# Altium footprint library WR-BHD.PcbLib: 220 footprints (part 7 of 14)
Each footprint in its own frame and in the unit in brackets; x right, y up, seen from the top. Pads: shape width x height; smd on the part's side, far side on the other; paste and mask are expansions set on the pad; w line width, h text height; cw(c..) or ccw(c..) is an arc to the next point about the centre after c.
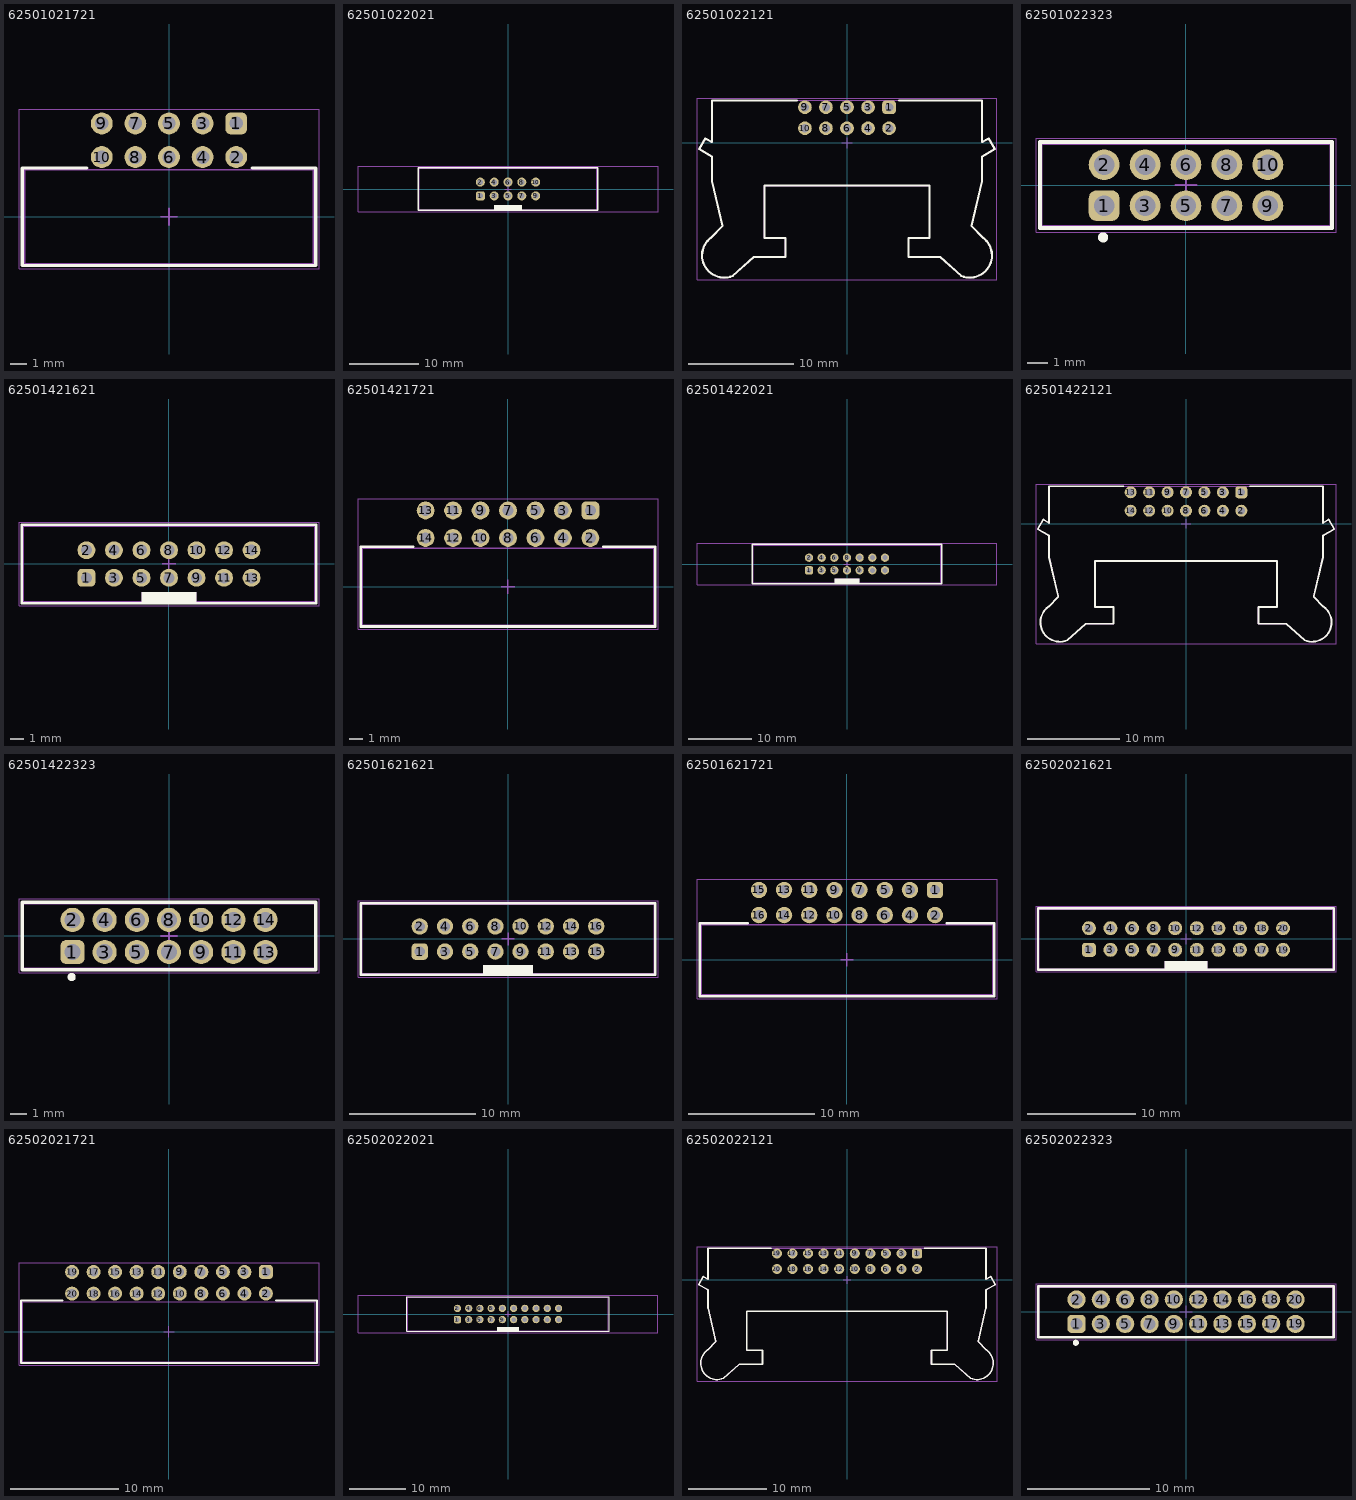
[diagram p6: the footprints below, top view; thin cyan lines are the x and y axes]

## 62501021721 [mm] "2.00mm Male Angled Box Header, 10p"
height 5.4
pads (10):
  rrect50% 1.3x1.3 hole 0.8: 1(4,5.55)
  round 1.3 hole 0.8: 2(4,3.55) 3(2,5.55) 4(2,3.55) 5(0,5.55) 6(0,3.55) 7(-2,5.55) 8(-2,3.55) 9(-4,5.55) 10(-4,3.55)
Top Overlay:
  lines w0.2: -4.9,2.9 -8.725,2.9 -8.725,-2.9 8.725,-2.9 8.725,2.9 4.95,2.9
Top Assembly:
  lines w0.1: -8.6,-2.8 -8.6,2.8 8.6,2.8 8.6,-2.8 -8.6,-2.8
Top Designator:
  text ".Designator" at -3.647,-0.357 h1
Top 3D Body:
  lines w0.1: -8.6,-2.8 8.6,-2.8 8.6,2.8 -8.6,2.8 -8.6,-2.8
Top Courtyard:
  lines w0.05: -8.925,-3.1 -8.925,6.4 8.925,6.4 8.925,-3.1 -8.925,-3.1
Top Component Center:
  lines w0.1: -0.5,0 0.5,0 ; 0,-0.5 0,0.5
3D body "62501021721.stp": height 5.5, standoff -2.83, extent -8.6,-2.8 8.6,5.85

## 62501022021 [mm] "2.00mm Male Box Header with Lever, 10p"
height 16.85
pads (10):
  rrect50% 1.3x1.3 hole 0.8: 1(-4,-1)
  round 1.3 hole 0.8: 2(-4,1) 3(-2,-1) 4(-2,1) 5(0,-1) 6(0,1) 7(2,-1) 8(2,1) 9(4,-1) 10(4,1)
Top Overlay:
  rectangle: -2,-3.1 2,-2.3
  lines w0.2: -13,-3.1 -13,3.1 13,3.1 13,-3.1 -13,-3.1
Top Assembly:
  rectangle: -2,-3 2,-2.3
  lines w0.1: -12.85,-3 -12.85,3 12.85,3 12.85,-3 -12.85,-3
Top Designator:
  text ".Designator" at -3.647,-0.357 h1
Top 3D Body:
  rectangle: -2,-3 2,-2.3
  lines w0.1: -12.85,-3 12.85,-3 12.85,3 -12.85,3 -12.85,-3
Top Courtyard:
  lines w0.05: -21.7,-3.3 21.7,-3.3 21.7,3.3 -21.7,3.3 -21.7,-3.3
Top Component Center:
  lines w0.1: -0.5,0 0.5,0 ; 0,-0.5 0,0.5
3D body "62501022021.stp": height 16.9, standoff -2.95, extent -14.062,-3 14.063,3

## 62501022121 [mm] "2.00mm Male Angled Box Header with Lever, 10p"
height 3.15
pads (10):
  rrect50% 1.3x1.3 hole 0.8: 1(4,3.4)
  round 1.3 hole 0.8: 2(4,1.4) 3(2,3.4) 4(2,1.4) 5(0,3.4) 6(0,1.4) 7(-2,3.4) 8(-2,1.4) 9(-4,3.4) 10(-4,1.4)
Top Overlay:
  lines w0.2: -13.466,0.438 -14.06,-0.59 -12.851,-1.288 -12.851,-3.622 ; -13.46,0.44 -12.848,0.087 ; -12.894,-8.986 ccw(c-11.68,-10.7) -10.865,-12.635 ; -12.892,-8.989 -11.85,-7.91 -12.837,-3.637 ; -12.85,0.089 -12.85,4.05 -4.75,4.05 ; -10.866,-12.634 -8.85,-10.85 -5.85,-10.85 -5.85,-9.05 -7.85,-9.05 -7.85,-4.05 7.85,-4.05 7.85,-9.05 5.85,-9.05 5.85,-10.85 8.85,-10.85 10.866,-12.634 ; 4.95,4.05 12.85,4.05 12.85,0.089 ; 10.865,-12.635 ccw(c11.68,-10.7) 12.894,-8.986 ; 12.837,-3.637 11.85,-7.91 12.892,-8.989 ; 12.848,0.087 13.46,0.44 ; 12.851,-3.622 12.851,-1.288 14.06,-0.59 13.466,0.438
Top Designator:
  text ".Designator" at -3.647,-0.357 h1
Top 3D Body:
  lines w0.1: -13.466,0.438 -14.06,-0.59 -12.851,-1.288 -12.851,-3.622 ; -13.46,0.44 -12.848,0.087 ; -12.894,-8.986 ccw(c-11.68,-10.7) -10.865,-12.635 ; -12.892,-8.989 -11.85,-7.91 -12.837,-3.637 ; -12.85,0.089 -12.85,4.05 12.85,4.05 ; -10.866,-12.634 -8.85,-10.85 -5.85,-10.85 -5.85,-9.05 -7.85,-9.05 -7.85,-4.05 7.85,-4.05 7.85,-9.05 5.85,-9.05 5.85,-10.85 8.85,-10.85 10.866,-12.634 ; 10.865,-12.635 ccw(c11.68,-10.7) 12.894,-8.986 ; 12.837,-3.637 11.85,-7.91 12.892,-8.989 ; 12.848,0.087 13.46,0.44 ; 12.848,4.048 12.85,4.05 ; 12.85,0.089 12.85,4.05 ; 12.851,-3.622 12.851,-1.288 14.06,-0.59 13.466,0.438
Top Courtyard:
  lines w0.05: -14.262,-13 14.262,-13 14.262,4.25 -14.262,4.25 -14.262,-13
Top Component Center:
  lines w0.1: -0.5,0 0.5,0 ; 0,-0.5 0,0.5
3D body "62501022121.stp": height 6.1, standoff -3.05, extent -14.062,-12.8 14.062,4.05

## 62501022323 [mm] "Board to Cable Transition Connector, pitch 2mm, 10p"
height 5
pads (10):
  rrect50% 1.5x1.5 hole 1: 1(-4,-1)
  round 1.5 hole 1: 2(-4,1) 3(-2,-1) 4(-2,1) 5(0,-1) 6(0,1) 7(2,-1) 8(2,1) 9(4,-1) 10(4,1)
Top Overlay:
  circle w0.25: c-4.05,-2.55 r0.125
  lines w0.2: -7.125,-2.1 -7.125,2.1 7.125,2.1 7.125,-2.1 -7.125,-2.1
Top Assembly:
  lines w0.1: -7.05,-2 -7.05,2 7.05,2 7.05,-2 -7.05,-2
Top Designator:
  text ".Designator" at -3.647,-0.357 h1
Top 3D Body:
  lines w0.1: -7.05,-2 7.05,-2 7.05,2 -7.05,2 -7.05,-2
Top Courtyard:
  lines w0.05: -7.325,-2.3 7.325,-2.3 7.325,2.3 -7.325,2.3 -7.325,-2.3
Top Component Center:
  lines w0.1: -0.5,0 0.5,0 ; 0,-0.5 0,0.5
3D body "62501022323.stp": height 7.23, standoff -2.77, extent -7.05,-2 7.05,2

## 62501421621 [mm] "2.00mm Male Box Header, 14p"
height 5.6
pads (14):
  rrect50% 1.3x1.3 hole 0.8: 1(-6,-1)
  round 1.3 hole 0.8: 2(-6,1) 3(-4,-1) 4(-4,1) 5(-2,-1) 6(-2,1) 7(0,-1) 8(0,1) 9(2,-1) 10(2,1) 11(4,-1) 12(4,1) 13(6,-1) 14(6,1)
Top Overlay:
  rectangle: -2,-2.85 2,-2.05
  lines w0.2: -10.7,-2.85 10.7,-2.85 10.7,2.85 -10.7,2.85 -10.7,-2.85
Top Assembly:
  rectangle: -2,-2.75 2,-2.05
  lines w0.1: -10.6,-2.75 -10.6,2.75 10.6,2.75 10.6,-2.75 -10.6,-2.75
Top Designator:
  text ".Designator" at -3.647,-0.357 h1
Top 3D Body:
  rectangle: -2,-2.75 2,-2.05
  lines w0.1: -10.6,-2.75 10.6,-2.75 10.6,2.75 -10.6,2.75 -10.6,-2.75
Top Courtyard:
  lines w0.05: -10.9,-3.05 -10.9,3.05 10.9,3.05 10.9,-3.05 -10.9,-3.05
Top Component Center:
  lines w0.1: -0.5,0 0.5,0 ; 0,-0.5 0,0.5
3D body "62501421621.stp": height 5.65, standoff -2.5, extent -10.6,-2.75 10.6,2.75

## 62501421721 [mm] "2.00mm Male Angled Box Header, 14p"
height 5.4
pads (14):
  rrect50% 1.3x1.3 hole 0.8: 1(6,5.55)
  round 1.3 hole 0.8: 2(6,3.55) 3(4,5.55) 4(4,3.55) 5(2,5.55) 6(2,3.55) 7(0,5.55) 8(0,3.55) 9(-2,5.55) 10(-2,3.55) 11(-4,5.55) 12(-4,3.55) 13(-6,5.55) 14(-6,3.55)
Top Overlay:
  lines w0.2: -6.9,2.9 -10.725,2.9 -10.725,-2.9 10.725,-2.9 10.725,2.9 6.95,2.9
Top Assembly:
  lines w0.1: -10.6,-2.8 -10.6,2.8 10.6,2.8 10.6,-2.8 -10.6,-2.8
Top Designator:
  text ".Designator" at -3.647,-0.357 h1
Top 3D Body:
  lines w0.1: -10.6,-2.8 10.6,-2.8 10.6,2.8 -10.6,2.8 -10.6,-2.8
Top Courtyard:
  lines w0.05: -10.925,-3.1 -10.925,6.4 10.925,6.4 10.925,-3.1 -10.925,-3.1
Top Component Center:
  lines w0.1: -0.5,0 0.5,0 ; 0,-0.5 0,0.5
3D body "62501421721 (rev1).stp": height 5.5, standoff -2.85, extent -10.6,-2.8 10.6,5.8

## 62501422021 [mm] "2.00mm Male Box Header with Lever, 14p"
height 16.85
pads (14):
  rrect50% 1.3x1.3 hole 0.8: 1(-6,-1)
  round 1.3 hole 0.8: 2(-6,1) 3(-4,-1) 4(-4,1) 5(-2,-1) 6(-2,1) 7(0,-1) 8(0,1) 9(2,-1) 10(2,1) 11(4,-1) 12(4,1) 13(6,-1) 14(6,1)
Top Overlay:
  rectangle: -2,-3.1 2,-2.3
  lines w0.2: -15,-3.1 15,-3.1 15,3.1 -15,3.1 -15,-3.1
Top Assembly:
  rectangle: -2,-3 2,-2.3
  lines w0.1: -14.85,-3 14.85,-3 14.85,3 -14.85,3 -14.85,-3
Top Designator:
  text ".Designator" at -3.647,-0.357 h1
Top 3D Body:
  rectangle: -2,-3 2,-2.3
  lines w0.1: -14.85,-3 -14.85,3 14.85,3 14.85,-3 -14.85,-3
Top Courtyard:
  lines w0.05: -23.7,-3.3 -23.7,3.3 23.7,3.3 23.7,-3.3 -23.7,-3.3
Top Component Center:
  lines w0.1: -0.5,0 0.5,0 ; 0,-0.5 0,0.5
3D body "62501422021.stp": height 16.9, standoff -2.95, extent -16.062,-3 16.063,3

## 62501422121 [mm] "2.00mm Male Angled Box Header with Lever, 14p"
height 3.15
pads (14):
  rrect50% 1.3x1.3 hole 0.8: 1(6,3.4)
  round 1.3 hole 0.8: 2(6,1.4) 3(4,3.4) 4(4,1.4) 5(2,3.4) 6(2,1.4) 7(0,3.4) 8(0,1.4) 9(-2,3.4) 10(-2,1.4) 11(-4,3.4) 12(-4,1.4) 13(-6,3.4) 14(-6,1.4)
Top Overlay:
  lines w0.2: -15.466,0.438 -16.06,-0.59 -14.851,-1.288 -14.851,-3.622 ; -15.46,0.44 -14.848,0.087 ; -14.894,-8.986 ccw(c-13.68,-10.7) -12.865,-12.635 ; -14.892,-8.989 -13.85,-7.91 -14.837,-3.637 ; -14.85,0.089 -14.85,4.05 -6.75,4.05 ; -12.866,-12.634 -10.85,-10.85 -7.85,-10.85 -7.85,-9.05 -9.85,-9.05 -9.85,-4.05 9.85,-4.05 9.85,-9.05 7.85,-9.05 7.85,-10.85 10.85,-10.85 12.866,-12.634 ; 6.95,4.05 14.85,4.05 14.85,0.089 ; 12.865,-12.635 ccw(c13.68,-10.7) 14.894,-8.986 ; 14.837,-3.637 13.85,-7.91 14.892,-8.989 ; 14.848,0.087 15.46,0.44 ; 14.851,-3.622 14.851,-1.288 16.06,-0.59 15.466,0.438
Top Designator:
  text ".Designator" at -3.647,-0.357 h1
Top 3D Body:
  lines w0.1: -15.466,0.438 -16.06,-0.59 -14.851,-1.288 -14.851,-3.622 ; -15.46,0.44 -14.848,0.087 ; -14.894,-8.986 ccw(c-13.68,-10.7) -12.865,-12.635 ; -14.892,-8.989 -13.85,-7.91 -14.837,-3.637 ; -14.85,0.089 -14.85,4.05 14.85,4.05 ; -12.866,-12.634 -10.85,-10.85 -7.85,-10.85 -7.85,-9.05 -9.85,-9.05 -9.85,-4.05 9.85,-4.05 9.85,-9.05 7.85,-9.05 7.85,-10.85 10.85,-10.85 12.866,-12.634 ; 12.865,-12.635 ccw(c13.68,-10.7) 14.894,-8.986 ; 14.837,-3.637 13.85,-7.91 14.892,-8.989 ; 14.848,0.087 15.46,0.44 ; 14.848,4.048 14.85,4.05 ; 14.85,0.089 14.85,4.05 ; 14.851,-3.622 14.851,-1.288 16.06,-0.59 15.466,0.438
Top Courtyard:
  lines w0.05: -16.262,-13 16.262,-13 16.262,4.25 -16.262,4.25 -16.262,-13
Top Component Center:
  lines w0.1: -0.5,0 0.5,0 ; 0,-0.5 0,0.5
3D body "62501422121.stp": height 6.1, standoff -3.05, extent -16.062,-12.8 16.062,4.05

## 62501422323 [mm] "Board to Cable Transition Connector, pitch 2mm, 14p"
height 5
pads (14):
  rrect50% 1.5x1.5 hole 1: 1(-6,-1)
  round 1.5 hole 1: 2(-6,1) 3(-4,-1) 4(-4,1) 5(-2,-1) 6(-2,1) 7(0,-1) 8(0,1) 9(2,-1) 10(2,1) 11(4,-1) 12(4,1) 13(6,-1) 14(6,1)
Top Overlay:
  circle w0.25: c-6.05,-2.55 r0.125
  lines w0.2: -9.125,-2.1 9.125,-2.1 9.125,2.1 -9.125,2.1 -9.125,-2.1
Top Assembly:
  lines w0.1: -9.05,-2 9.05,-2 9.05,2 -9.05,2 -9.05,-2
Top Designator:
  text ".Designator" at -3.647,-0.357 h1
Top 3D Body:
  lines w0.1: -9.05,-2 -9.05,2 9.05,2 9.05,-2 -9.05,-2
Top Courtyard:
  lines w0.05: -9.325,-2.3 -9.325,2.3 9.325,2.3 9.325,-2.3 -9.325,-2.3
Top Component Center:
  lines w0.1: -0.5,0 0.5,0 ; 0,-0.5 0,0.5
3D body "62501422323.stp": height 7.23, standoff -2.77, extent -9.05,-2 9.05,2

## 62501621621 [mm] "2.00mm Male Box Header, 16p"
height 5.6
pads (16):
  rrect50% 1.3x1.3 hole 0.8: 1(-7,-1)
  round 1.3 hole 0.8: 2(-7,1) 3(-5,-1) 4(-5,1) 5(-3,-1) 6(-3,1) 7(-1,-1) 8(-1,1) 9(1,-1) 10(1,1) 11(3,-1) 12(3,1) 13(5,-1) 14(5,1) 15(7,-1) 16(7,1)
Top Overlay:
  rectangle: -2,-2.85 2,-2.05
  lines w0.2: -11.7,-2.85 -11.7,2.85 11.7,2.85 11.7,-2.85 -11.7,-2.85
Top Assembly:
  rectangle: -2,-2.75 2,-2.05
  lines w0.1: -11.6,-2.75 11.6,-2.75 11.6,2.75 -11.6,2.75 -11.6,-2.75
Top Designator:
  text ".Designator" at -3.647,-0.357 h1
Top 3D Body:
  rectangle: -2,-2.75 2,-2.05
  lines w0.1: -11.6,-2.75 -11.6,2.75 11.6,2.75 11.6,-2.75 -11.6,-2.75
Top Courtyard:
  lines w0.05: -11.9,-3.05 11.9,-3.05 11.9,3.05 -11.9,3.05 -11.9,-3.05
Top Component Center:
  lines w0.1: -0.5,0 0.5,0 ; 0,-0.5 0,0.5
3D body "62501621621.stp": height 5.65, standoff -2.5, extent -11.6,-2.75 11.6,2.75

## 62501621721 [mm] "2.00mm Male Angled Box Header, 16p"
height 5.4
pads (16):
  rrect50% 1.3x1.3 hole 0.8: 1(7,5.55)
  round 1.3 hole 0.8: 2(7,3.55) 3(5,5.55) 4(5,3.55) 5(3,5.55) 6(3,3.55) 7(1,5.55) 8(1,3.55) 9(-1,5.55) 10(-1,3.55) 11(-3,5.55) 12(-3,3.55) 13(-5,5.55) 14(-5,3.55) 15(-7,5.55) 16(-7,3.55)
Top Overlay:
  lines w0.2: -7.9,2.9 -11.725,2.9 -11.725,-2.9 11.725,-2.9 11.725,2.9 7.95,2.9
Top Assembly:
  lines w0.1: -11.6,-2.8 -11.6,2.8 11.6,2.8 11.6,-2.8 -11.6,-2.8
Top Designator:
  text ".Designator" at -3.647,-0.357 h1
Top 3D Body:
  lines w0.1: -11.6,-2.8 11.6,-2.8 11.6,2.8 -11.6,2.8 -11.6,-2.8
Top Courtyard:
  lines w0.05: -11.925,-3.1 -11.925,6.4 11.925,6.4 11.925,-3.1 -11.925,-3.1
Top Component Center:
  lines w0.1: -0.5,0 0.5,0 ; 0,-0.5 0,0.5
3D body "62501621721 (rev1).stp": height 5.5, standoff -2.85, extent -11.6,-2.8 11.6,5.8

## 62502021621 [mm] "2.00mm Male Box Header, 20p"
height 5.6
pads (20):
  rrect50% 1.3x1.3 hole 0.8: 1(-9,-1)
  round 1.3 hole 0.8: 2(-9,1) 3(-7,-1) 4(-7,1) 5(-5,-1) 6(-5,1) 7(-3,-1) 8(-3,1) 9(-1,-1) 10(-1,1) 11(1,-1) 12(1,1) 13(3,-1) 14(3,1) 15(5,-1) 16(5,1) 17(7,-1) 18(7,1) 19(9,-1) 20(9,1)
Top Overlay:
  rectangle: -2,-2.85 2,-2.05
  lines w0.2: -13.7,-2.85 -13.7,2.85 13.7,2.85 13.7,-2.85 -13.7,-2.85
Top Assembly:
  rectangle: -2,-2.75 2,-2.05
  lines w0.1: -13.6,-2.75 13.6,-2.75 13.6,2.75 -13.6,2.75 -13.6,-2.75
Top Designator:
  text ".Designator" at -3.647,-0.357 h1
Top 3D Body:
  rectangle: -2,-2.75 2,-2.05
  lines w0.1: -13.6,-2.75 -13.6,2.75 13.6,2.75 13.6,-2.75 -13.6,-2.75
Top Courtyard:
  lines w0.05: -13.9,-3.05 13.9,-3.05 13.9,3.05 -13.9,3.05 -13.9,-3.05
Top Component Center:
  lines w0.1: -0.5,0 0.5,0 ; 0,-0.5 0,0.5
3D body "62502021621.stp": height 5.65, standoff -2.5, extent -13.6,-2.75 13.6,2.75

## 62502021721 [mm] "2.00mm Male Angled Box Header, 20p"
height 5.4
pads (20):
  rrect50% 1.3x1.3 hole 0.8: 1(9,5.55)
  round 1.3 hole 0.8: 2(9,3.55) 3(7,5.55) 4(7,3.55) 5(5,5.55) 6(5,3.55) 7(3,5.55) 8(3,3.55) 9(1,5.55) 10(1,3.55) 11(-1,5.55) 12(-1,3.55) 13(-3,5.55) 14(-3,3.55) 15(-5,5.55) 16(-5,3.55) 17(-7,5.55) 18(-7,3.55) 19(-9,5.55) 20(-9,3.55)
Top Overlay:
  lines w0.2: -9.9,2.9 -13.725,2.9 -13.725,-2.9 13.725,-2.9 13.725,2.9 9.95,2.9
Top Assembly:
  lines w0.1: -13.6,-2.8 13.6,-2.8 13.6,2.8 -13.6,2.8 -13.6,-2.8
Top Designator:
  text ".Designator" at -3.647,-0.357 h1
Top 3D Body:
  lines w0.1: -13.6,-2.8 -13.6,2.8 13.6,2.8 13.6,-2.8 -13.6,-2.8
Top Courtyard:
  lines w0.05: -13.925,-3.1 13.925,-3.1 13.925,6.4 -13.925,6.4 -13.925,-3.1
Top Component Center:
  lines w0.1: -0.5,0 0.5,0 ; 0,-0.5 0,0.5
3D body "62502021721 (rev1).stp": height 5.5, standoff -2.85, extent -13.6,-2.8 13.6,5.8

## 62502022021 [mm] "2.00mm Male Box Header with Lever, 20p"
height 16.85
pads (20):
  rrect50% 1.3x1.3 hole 0.8: 1(-9,-1)
  round 1.3 hole 0.8: 2(-9,1) 3(-7,-1) 4(-7,1) 5(-5,-1) 6(-5,1) 7(-3,-1) 8(-3,1) 9(-1,-1) 10(-1,1) 11(1,-1) 12(1,1) 13(3,-1) 14(3,1) 15(5,-1) 16(5,1) 17(7,-1) 18(7,1) 19(9,-1) 20(9,1)
Top Overlay:
  rectangle: -2,-3.1 2,-2.3
  lines w0.2: -18,-3.1 18,-3.1 18,3.1 -18,3.1 -18,-3.1
Top Assembly:
  rectangle: -2,-3 2,-2.3
  lines w0.1: -17.85,-3 17.85,-3 17.85,3 -17.85,3 -17.85,-3
Top Designator:
  text ".Designator" at -3.647,-0.357 h1
Top 3D Body:
  rectangle: -2,-3 2,-2.3
  lines w0.1: -17.85,-3 -17.85,3 17.85,3 17.85,-3 -17.85,-3
Top Courtyard:
  lines w0.05: -26.7,-3.3 -26.7,3.3 26.7,3.3 26.7,-3.3 -26.7,-3.3
Top Component Center:
  lines w0.1: -0.5,0 0.5,0 ; 0,-0.5 0,0.5
3D body "62502022021.stp": height 16.9, standoff -2.95, extent -19.062,-3 19.063,3

## 62502022121 [mm] "2.00mm Male Angled Box Header with Lever, 20p"
height 3.15
pads (20):
  rrect50% 1.3x1.3 hole 0.8: 1(9,3.4)
  round 1.3 hole 0.8: 2(9,1.4) 3(7,3.4) 4(7,1.4) 5(5,3.4) 6(5,1.4) 7(3,3.4) 8(3,1.4) 9(1,3.4) 10(1,1.4) 11(-1,3.4) 12(-1,1.4) 13(-3,3.4) 14(-3,1.4) 15(-5,3.4) 16(-5,1.4) 17(-7,3.4) 18(-7,1.4) 19(-9,3.4) 20(-9,1.4)
Top Overlay:
  lines w0.2: -18.466,0.438 -19.06,-0.59 -17.851,-1.288 -17.851,-3.622 ; -18.46,0.44 -17.848,0.087 ; -17.894,-8.986 ccw(c-16.68,-10.7) -15.865,-12.635 ; -17.892,-8.989 -16.85,-7.91 -17.837,-3.637 ; -17.85,0.089 -17.85,4.05 -9.75,4.05 ; -15.866,-12.634 -13.85,-10.85 -10.85,-10.85 -10.85,-9.05 -12.85,-9.05 -12.85,-4.05 12.85,-4.05 12.85,-9.05 10.85,-9.05 10.85,-10.85 13.85,-10.85 15.866,-12.634 ; 9.95,4.05 17.85,4.05 17.85,0.089 ; 15.865,-12.635 ccw(c16.68,-10.7) 17.894,-8.986 ; 17.837,-3.637 16.85,-7.91 17.892,-8.989 ; 17.848,0.087 18.46,0.44 ; 17.851,-3.622 17.851,-1.288 19.06,-0.59 18.466,0.438
Top Designator:
  text ".Designator" at -3.647,-0.357 h1
Top 3D Body:
  lines w0.1: -18.466,0.438 -19.06,-0.59 -17.851,-1.288 -17.851,-3.622 ; -18.46,0.44 -17.848,0.087 ; -17.894,-8.986 ccw(c-16.68,-10.7) -15.865,-12.635 ; -17.892,-8.989 -16.85,-7.91 -17.837,-3.637 ; -17.85,0.089 -17.85,4.05 17.85,4.05 ; -15.866,-12.634 -13.85,-10.85 -10.85,-10.85 -10.85,-9.05 -12.85,-9.05 -12.85,-4.05 12.85,-4.05 12.85,-9.05 10.85,-9.05 10.85,-10.85 13.85,-10.85 15.866,-12.634 ; 15.865,-12.635 ccw(c16.68,-10.7) 17.894,-8.986 ; 17.837,-3.637 16.85,-7.91 17.892,-8.989 ; 17.848,0.087 18.46,0.44 ; 17.848,4.048 17.85,4.05 ; 17.85,0.089 17.85,4.05 ; 17.851,-3.622 17.851,-1.288 19.06,-0.59 18.466,0.438
Top Courtyard:
  lines w0.05: -19.262,-13 19.262,-13 19.262,4.25 -19.262,4.25 -19.262,-13
Top Component Center:
  lines w0.1: -0.5,0 0.5,0 ; 0,-0.5 0,0.5
3D body "62502022121.stp": height 6.1, standoff -3.05, extent -19.062,-12.8 19.062,4.05

## 62502022323 [mm] "Board to Cable Transition Connector, pitch 2mm, 20p"
height 5
pads (20):
  rrect50% 1.5x1.5 hole 1: 1(-9,-1)
  round 1.5 hole 1: 2(-9,1) 3(-7,-1) 4(-7,1) 5(-5,-1) 6(-5,1) 7(-3,-1) 8(-3,1) 9(-1,-1) 10(-1,1) 11(1,-1) 12(1,1) 13(3,-1) 14(3,1) 15(5,-1) 16(5,1) 17(7,-1) 18(7,1) 19(9,-1) 20(9,1)
Top Overlay:
  circle w0.25: c-9.05,-2.55 r0.125
  lines w0.2: -12.125,-2.1 12.125,-2.1 12.125,2.1 -12.125,2.1 -12.125,-2.1
Top Assembly:
  lines w0.1: -12.05,-2 12.05,-2 12.05,2 -12.05,2 -12.05,-2
Top Designator:
  text ".Designator" at -3.647,-0.357 h1
Top 3D Body:
  lines w0.1: -12.05,-2 -12.05,2 12.05,2 12.05,-2 -12.05,-2
Top Courtyard:
  lines w0.05: -12.325,-2.3 -12.325,2.3 12.325,2.3 12.325,-2.3 -12.325,-2.3
Top Component Center:
  lines w0.1: -0.5,0 0.5,0 ; 0,-0.5 0,0.5
3D body "62502022323.stp": height 7.23, standoff -2.77, extent -12.05,-2 12.05,2